# Altium footprint library Connector.PcbLib: 272 footprints (part 13 of 17)
Each footprint in its own frame and in the unit in brackets; x right, y up, seen from the top. Pads: shape width x height; smd on the part's side, far side on the other; paste and mask are expansions set on the pad; w line width, h text height; cw(c..) or ccw(c..) is an arc to the next point about the centre after c.
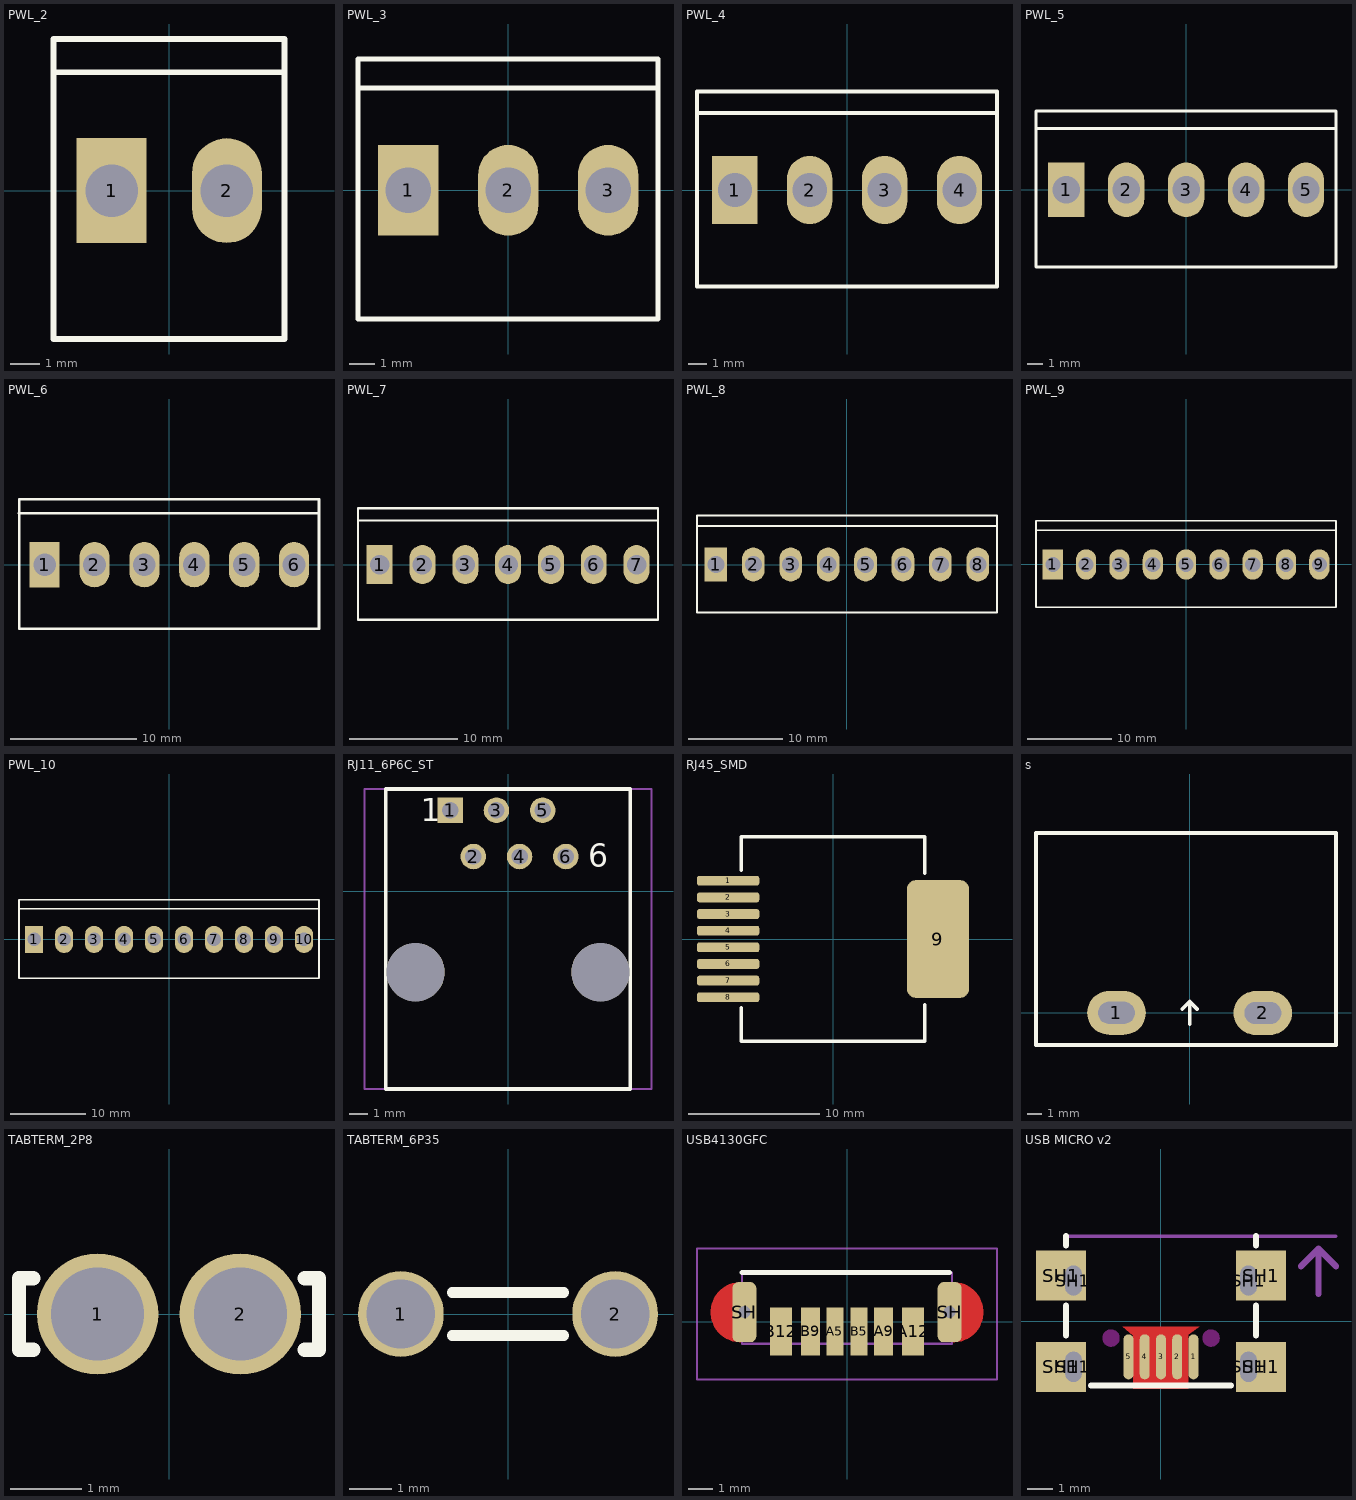
[diagram p12: the footprints below, top view; thin cyan lines are the x and y axes]

## PWL_2 [mm] "Connector; Header; 2 Position"
height 0.001
pads (2):
  rect 2.4x3.6 hole 1.8: 1(-1.98,0)
  oval 2.4x3.6 hole 1.8: 2(1.98,0)
Top Overlay:
  lines w0.2: -3.98,4.064 3.96,4.064 ; -3.98,-5.1 3.96,-5.1 3.96,5.207 -3.98,5.207 -3.98,-5.1
Top Designator:
  text ".Designator" at -3.72,-0.29 h1.52
3D body "PWL-2.stp": height 13.5, standoff -4, extent -3.96,-5 3.96,5

## PWL_3 [mm] "Connector; Header; 3 Position"
height 0.001
pads (3):
  rect 2.4x3.6 hole 1.8: 1(-3.96,0)
  oval 2.4x3.6 hole 1.8: 2(0,0) 3(3.96,0)
Top Overlay:
  lines w0.2: -5.96,4.064 5.94,4.064 ; -5.96,-5.1 5.94,-5.1 5.94,5.207 -5.96,5.207 -5.96,-5.1
Top Designator:
  text ".Designator" at -3.72,-0.29 h1.52
3D body "PWL-3.stp": height 13.5, standoff -4, extent -5.94,-5 5.94,5

## PWL_4 [mm] "Connector; Header; 4 Position"
height 0.001
pads (4):
  rect 2.4x3.6 hole 1.8: 1(-5.94,0)
  oval 2.4x3.6 hole 1.8: 2(-1.98,0) 3(1.98,0) 4(5.94,0)
Top Overlay:
  lines w0.2: -7.94,4.064 7.92,4.064 ; -7.94,-5.1 -7.94,5.207 7.92,5.207 7.92,-5.1 -7.94,-5.1
Top Designator:
  text ".Designator" at -3.72,-0.29 h1.52
3D body "PWL-4.stp": height 13.5, standoff -4, extent -7.92,-5 7.92,5

## PWL_5 [mm] "Connector; Header; 5 Position"
height 0.001
pads (5):
  rect 2.4x3.6 hole 1.8: 1(-7.92,0)
  oval 2.4x3.6 hole 1.8: 2(-3.96,0) 3(0,0) 4(3.96,0) 5(7.92,0)
Top Overlay:
  lines w0.2: -9.92,4.064 9.9,4.064 ; -9.92,-5.1 9.9,-5.1 9.9,5.207 -9.92,5.207 -9.92,-5.1
Top Designator:
  text ".Designator" at -3.72,-0.29 h1.52
3D body "PWL-5.stp": height 13.5, standoff -4, extent -9.9,-5 9.9,5

## PWL_6 [mm] "Connector; Header; 6 Position"
height 0.001
pads (6):
  rect 2.4x3.6 hole 1.8: 1(-9.9,0)
  oval 2.4x3.6 hole 1.8: 2(-5.94,0) 3(-1.98,0) 4(1.98,0) 5(5.94,0) 6(9.9,0)
Top Overlay:
  lines w0.2: -11.932,4.064 11.88,4.064 ; -11.9,-5.1 -11.9,5.207 11.88,5.207 11.88,-5.1 -11.9,-5.1
Top Designator:
  text ".Designator" at -3.736,-0.29 h1.52
3D body "PWL-6.stp": height 13.5, standoff -4, extent -11.88,-5 11.88,5

## PWL_7 [mm] "Connector; Header; 7 Position"
height 0.001
pads (7):
  rect 2.4x3.6 hole 1.8: 1(-11.88,0)
  oval 2.4x3.6 hole 1.8: 2(-7.92,0) 3(-3.96,0) 4(0,0) 5(3.96,0) 6(7.92,0) 7(11.88,0)
Top Overlay:
  lines w0.2: -13.88,4.064 13.86,4.064 ; -13.88,-5.1 -13.88,5.207 13.86,5.207 13.86,-5.1 -13.88,-5.1
Top Designator:
  text ".Designator" at -3.72,-0.29 h1.52
3D body "PWL-7.stp": height 13.5, standoff -4, extent -13.86,-5 13.86,5

## PWL_8 [mm] "Connector; Header; 8 Position"
height 0.001
pads (8):
  rect 2.4x3.6 hole 1.8: 1(-13.86,0)
  oval 2.4x3.6 hole 1.8: 2(-9.9,0) 3(-5.94,0) 4(-1.98,0) 5(1.98,0) 6(5.94,0) 7(9.9,0) 8(13.86,0)
Top Overlay:
  lines w0.2: -15.86,4.064 15.89,4.064 ; -15.86,-5.1 -15.86,5.207 15.89,5.207 15.89,-5.1 -15.86,-5.1
Top Designator:
  text ".Designator" at -3.695,-0.29 h1.52
3D body "PWL-8.stp": height 13.5, standoff -4, extent -15.822,-4.92 15.858,5.08

## PWL_9 [mm] "Connector; Header; 9 Position"
height 0.001
pads (9):
  rect 2.4x3.6 hole 1.8: 1(-15.84,0)
  oval 2.4x3.6 hole 1.8: 2(-11.88,0) 3(-7.92,0) 4(-3.96,0) 5(0,0) 6(3.96,0) 7(7.92,0) 8(11.88,0) 9(15.84,0)
Top Overlay:
  lines w0.2: -17.84,4.064 17.82,4.064 ; -17.84,-5.1 17.82,-5.1 17.82,5.207 -17.84,5.207 -17.84,-5.1
Top Designator:
  text ".Designator" at -3.72,-0.29 h1.52
3D body "PWL-9.stp": height 13.5, standoff -4, extent -17.82,-5 17.82,5

## PWL_10 [mm] "Connector; Header; 10 Position"
height 0.001
pads (10):
  rect 2.4x3.6 hole 1.8: 1(-17.82,0)
  oval 2.4x3.6 hole 1.8: 2(-13.86,0) 3(-9.9,0) 4(-5.94,0) 5(-1.98,0) 6(1.98,0) 7(5.94,0) 8(9.9,0) 9(13.86,0) 10(17.82,0)
Top Overlay:
  lines w0.2: -19.82,4.064 19.8,4.064 ; -19.82,-5.1 -19.82,5.207 19.8,5.207 19.8,-5.1 -19.82,-5.1
Top Designator:
  text ".Designator" at -3.72,-0.29 h1.52
3D body "PWL-10.stp": height 13.5, standoff -4, extent -19.8,-5 19.8,5

## RJ11_6P6C_ST [mm] "RJ11, 6P6C, Straight, WURTH 615006144121"
height 16.38
pads (8):
  rect 1.4x1.4 hole 0.9: 1(-3.175,4.445)
  round 1.4 hole 0.9: 2(-1.905,1.905) 3(-0.635,4.445) 4(0.635,1.905) 5(1.905,4.445) 6(3.175,1.905)
  round 3.2 hole 3.2 unplated: ""(-5.08,-4.445) ""(5.08,-4.445)
Top Overlay:
  lines w0.2: -6.725,-10.865 -6.725,5.615 6.725,5.615 6.725,-10.865 -6.725,-10.865
  text "6" at 4.4,1.335 h1.27
  text "1" at -4.8,3.835 h1.27
Top Designator:
  text ".Designator" at -3.71,-2.969 h1.52
Mechanical 13:
  lines w0.127: -7.887,-10.865 -7.887,5.615 7.887,5.615 7.887,-10.865 -7.887,-10.865
3D body "615006144121.stp": height 15.95, standoff -3.73, extent -7.887,-10.865 7.813,5.615

## RJ45_SMD [mm] "8P8C"
pads (9):
  rrect50% 4.75x0.75 smd: 1(-8,4.445) 2(-8,3.175) 3(-8,1.905) 4(-8,0.635) 5(-8,-0.635) 6(-8,-1.905) 7(-8,-3.175) 8(-8,-4.445)
  rrect30% 4.75x9 smd: 9(8,0)
Top Overlay:
  lines w0.254: -7,-5.25 -7,-7.8 7,-7.8 7,-5 ; -7,5.25 -7,7.8 7,7.8 7,5
Top Designator:
  text ".Designator" at -3.71,-0.344 h1.52
Mechanical 15:
  text ".Designator" at -0.452,4.874 h2
3D body "RJ45_SMD.step": height 12.9, standoff 0.1, extent -9.86,-7.86 9.86,7.86

## s [mm]
pads (2):
  oval 4x3 hole 1.5 slot 2.5 at 0 deg: 1(-5,0.006) 2(5,-0.006)
Top Overlay:
  lines w0.254: -0.508,0.273 0,0.781 ; 0,-0.781 0,0.781 ; 0.508,0.273 0,0.781 ; -10.5,-2.2 -10.5,12.3 10,12.3 10,-2.2 -10.5,-2.2
Top Designator:
  text ".Designator" at -4.9,3.662 h1.52
3D body "User Library-KF1000-2P.STEP": height 14.81, standoff -8.99, extent -10.55,-2.2 9.95,12.3

## TABTERM_2P8 [mm] "Tab terminal FASTON 110, 2.8 mm width, 0.8 mm thickness"
height 10
pads (2):
  round 1.7 / inner round 1.7 / far side oval 1.7x2.5 hole 1.3: 1(-1,0) 2(1,0)
Top Overlay:
  lines w0.2: -1.9,-0.5 -2.1,-0.5 -2.1,0.5 -1.9,0.5 ; 1.9,-0.5 2.1,-0.5 2.1,0.5 1.9,0.5
Top Designator:
  text ".Designator" at -3.71,-0.344 h1.52
3D body "TAB110.step": height 8.2, standoff -4, extent -2.01,-0.4 1.99,0.4

## TABTERM_6P35 [mm] "Tab terminal FASTON 250, 6.35 mm width, 0.8 mm thickness"
height 10
pads (2):
  round 2 / inner round 2 / far side oval 3.2x2.4 hole 1.6: 1(-2.5,0) 2(2.5,0)
Top Overlay:
  lines w0.254: -1.3,-0.5 1.3,-0.5 ; -1.3,0.5 1.3,0.5
Top Designator:
  text ".Designator" at -3.71,-0.344 h1.52
3D body "726386-2.stp": height 10.16, standoff -3.84, extent -3.96,-0.4 4.04,0.4

## USB4130GFC [mm]
pads (10):
  rect 0.7x2 smd: A5(-0.5,-0.4) B5(0.5,-0.4)
  rect 0.8x2 smd: A9(1.52,-0.4) B9(-1.52,-0.4)
  rect 0.9x2 smd: A12(2.75,-0.4) B12(-2.75,-0.4)
  round 0.025 smd: SH(-5.047,0.4) SH(5.047,0.4)
  rrect50% 1x2.5 hole 0.5 square: SH(-4.27,0.4) SH(4.27,0.4)
Top Layer:
  region: 4.422,-0.85 4.492,-0.85 4.631,-0.834 4.768,-0.803 4.901,-0.757 5.027,-0.696 5.146,-0.621 5.256,-0.534 5.355,-0.434 5.443,-0.324 5.517,-0.206 5.578,-0.079 5.625,0.053 5.656,0.19 5.672,0.33 5.672,0.47 5.656,0.61 5.625,0.747 5.578,0.879 5.517,1.006 5.443,1.124 5.355,1.234 5.256,1.334 5.146,1.421 5.027,1.496 4.901,1.557 4.768,1.603 4.631,1.634 4.492,1.65 4.422,1.65
  region: -4.422,-0.85 -4.492,-0.85 -4.631,-0.834 -4.768,-0.803 -4.901,-0.757 -5.027,-0.696 -5.146,-0.621 -5.256,-0.534 -5.355,-0.434 -5.443,-0.324 -5.517,-0.206 -5.578,-0.079 -5.625,0.053 -5.656,0.19 -5.672,0.33 -5.672,0.47 -5.656,0.61 -5.625,0.747 -5.578,0.879 -5.517,1.006 -5.443,1.124 -5.355,1.234 -5.256,1.334 -5.146,1.421 -5.027,1.496 -4.901,1.557 -4.768,1.603 -4.631,1.634 -4.492,1.65 -4.422,1.65
Top Overlay:
  lines w0.2: -4.37,2.05 4.27,2.05
Mechanical 15:
  lines w0.1: -4.37,-0.91 4.37,-0.91 4.37,2.05 -4.37,2.05 -4.37,-0.91
Mechanical 20:
  lines w0.1: -6.245,-2.4 6.245,-2.4 6.245,3.05 -6.245,3.05 -6.245,-2.4
3D body "USB4130-GF-C.step": height 6.5, standoff -1.2, extent -4.37,-1.005 4.37,2.145

## USB MICRO v2 [mm]
pads (13):
  oval 0.4x1.8 smd: 1(1.3,-1.425) 2(0.65,-1.425) 3(0,-1.425) 4(-0.65,-1.425) 5(-1.3,-1.425)
  rect 2x2 smd: SH1(-4,-1.825) SH1(-4,1.825) SH1(4,-1.825) SH1(4,1.825)
  oval 1x1.6 hole 0.65 slot 1.2 at 90 deg: SH1(-3.5,-1.825) SH1(-3.5,1.625) SH1(3.5,-1.825) SH1(3.5,1.625)
Top Layer:
  pour cut-out: 1.1,-0.551 1.526,-0.229 1.118,-0.229 -1.1,-0.229 -1.537,-0.229 -1.1,-0.579 -1.1,-2.697 1.1,-2.697
Top Overlay:
  lines w0.254: -3.8,-0.575 -3.8,0.625 ; -3.8,3.025 -3.8,3.4 ; -2.8,-2.575 2.8,-2.575 ; 3.8,-0.575 3.8,0.625 ; 3.8,3.025 3.8,3.4
Keep-Out Layer:
  board cut-out: -2,-0.975 -2.06,-0.975 -2.17,-0.929 -2.254,-0.845 -2.3,-0.735 -2.3,-0.675 -2.3,-0.615 -2.254,-0.505 -2.17,-0.421 -2.06,-0.375 -2,-0.375 -1.94,-0.375 -1.83,-0.421 -1.746,-0.505 -1.7,-0.615 -1.7,-0.675 -1.7,-0.735 -1.746,-0.845 -1.83,-0.929 -1.94,-0.975
  board cut-out: 1.7,-0.675 1.7,-0.735 1.746,-0.845 1.83,-0.929 1.94,-0.975 2,-0.975 2.06,-0.975 2.17,-0.929 2.254,-0.845 2.3,-0.735 2.3,-0.675 2.3,-0.615 2.254,-0.505 2.17,-0.421 2.06,-0.375 2,-0.375 1.94,-0.375 1.83,-0.421 1.746,-0.505 1.7,-0.615
Keep-Out Layer:
  circle w0.1: c-2,-0.675 r0.3
  circle w0.1: c2,-0.675 r0.3
Top Designator:
  text ".Designator" at -0.116,0.283 h1.52
Mechanical 15:
  lines w0.127: -3.8,3.4 7,3.4
  lines w0.254: 5.6,2.2 6.3,2.9 ; 6.3,1.1 6.3,2.9 ; 7,2.2 6.3,2.9 ; 6.3,2.9 6.3,2.9
  text ".Designator" at -3.65,-0.338 h1.5
  text "Edge of Board" at 6.3,0.089 h1
  text "GNG ID D+ D- Vsub" at -2.07,-0.163 h0.51
3D body "User Library-MicroUSB-B_Molex_105017-0001.step": height 2.73, standoff -0.58, extent -4.1,-1.25 4.1,4.18